# Altium integrated library E0515S-1WR3.IntLib: 1 symbol
Pins are listed as number, name and electrical type; pins without a type are passive.

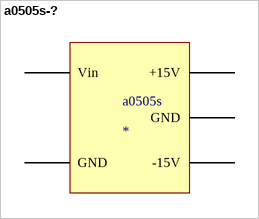
[diagram p0: symbol a0505s-?]

## a0505s-?
designator a0505s
footprint PCBComponent_1
pins: 0 Vin, 1 GND, 2 -15V, 3 GND, 4 +15V